# Altium integrated library EM_LIB.IntLib: 1 symbol
Pins are listed as number, name and electrical type; pins without a type are passive.

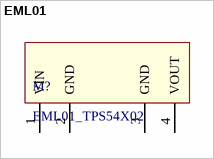
[diagram p0: symbol EML01]

## EML01
designator M?, comment EML01_TPS54X02
footprint EML01_TPS54X02
pins: 1 VIN, 2 GND, 3 GND, 4 VOUT